# Altium schematic symbol library integrating_box_light_source.SchLib: 21 symbols
Pins are listed as number, name and electrical type; pins without a type are passive.

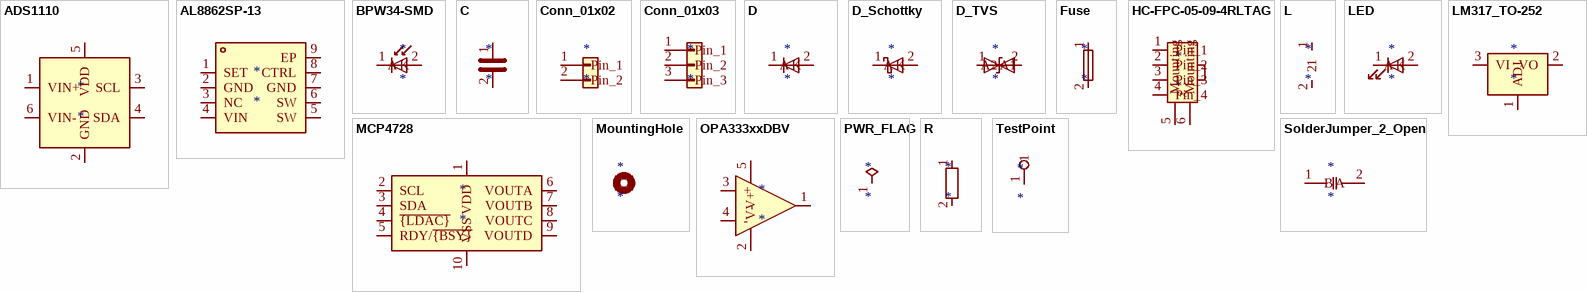
[diagram p0: symbols ADS1110 to TestPoint]

## ADS1110
designator *
pins: 1 VIN+, 2 GND, 3 SCL, 4 SDA, 5 VDD, 6 VIN-

## AL8862SP-13
designator *
pins: 1 SET, 2 GND, 3 NC, 4 VIN, 5 SW, 6 SW, 7 GND, 8 CTRL, 9 EP

## BPW34-SMD
designator *
pins: 1 K, 2 A

## C
designator *
pins: 1, 2

## Conn_01x02
designator *
pins: 1 Pin_1, 2 Pin_2

## Conn_01x03
designator *
pins: 1 Pin_1, 2 Pin_2, 3 Pin_3

## D
designator *
pins: 1 K, 2 A

## D_Schottky
designator *
pins: 1 K, 2 A

## D_TVS
designator *
pins: 1 A1, 2 A2

## Fuse
designator *
pins: 1, 2

## HC-FPC-05-09-4RLTAG
designator *
pins: 1 Pin_1, 2 Pin_2, 3 Pin_3, 4 Pin_4, 5 Mounting, 6 Mounting
text: FPC

## L
designator *
pins: 1, 2

## LED
designator *
pins: 1 K, 2 A

## LM317_TO-252
designator *
pins: 1 ADJ, 2 VO, 3 VI

## MCP4728
designator *
pins: 1 VDD, 2 SCL, 3 SDA, 4 ~{{LDAC}}, 5 RDY/~{{BSY}}, 6 VOUTA, 7 VOUTB, 8 VOUTC, 9 VOUTD, 10 VSS

## MountingHole
designator *

## OPA333xxDBV
designator *
pins: 1, 2 V-, 3 +, 4 -, 5 V+

## PWR_FLAG
designator *  (graphical)
pins: 1

## R
designator *
pins: 1, 2

## SolderJumper_2_Open
designator *
pins: 1 A, 2 B

## TestPoint
designator *
pins: 1